# Altium footprint library WR-DSUB.PcbLib: 64 footprints (part 3 of 4)
Each footprint in its own frame and in the unit in brackets; x right, y up, seen from the top. Pads: shape width x height; smd on the part's side, far side on the other; paste and mask are expansions set on the pad; w line width, h text height; cw(c..) or ccw(c..) is an arc to the next point about the centre after c.
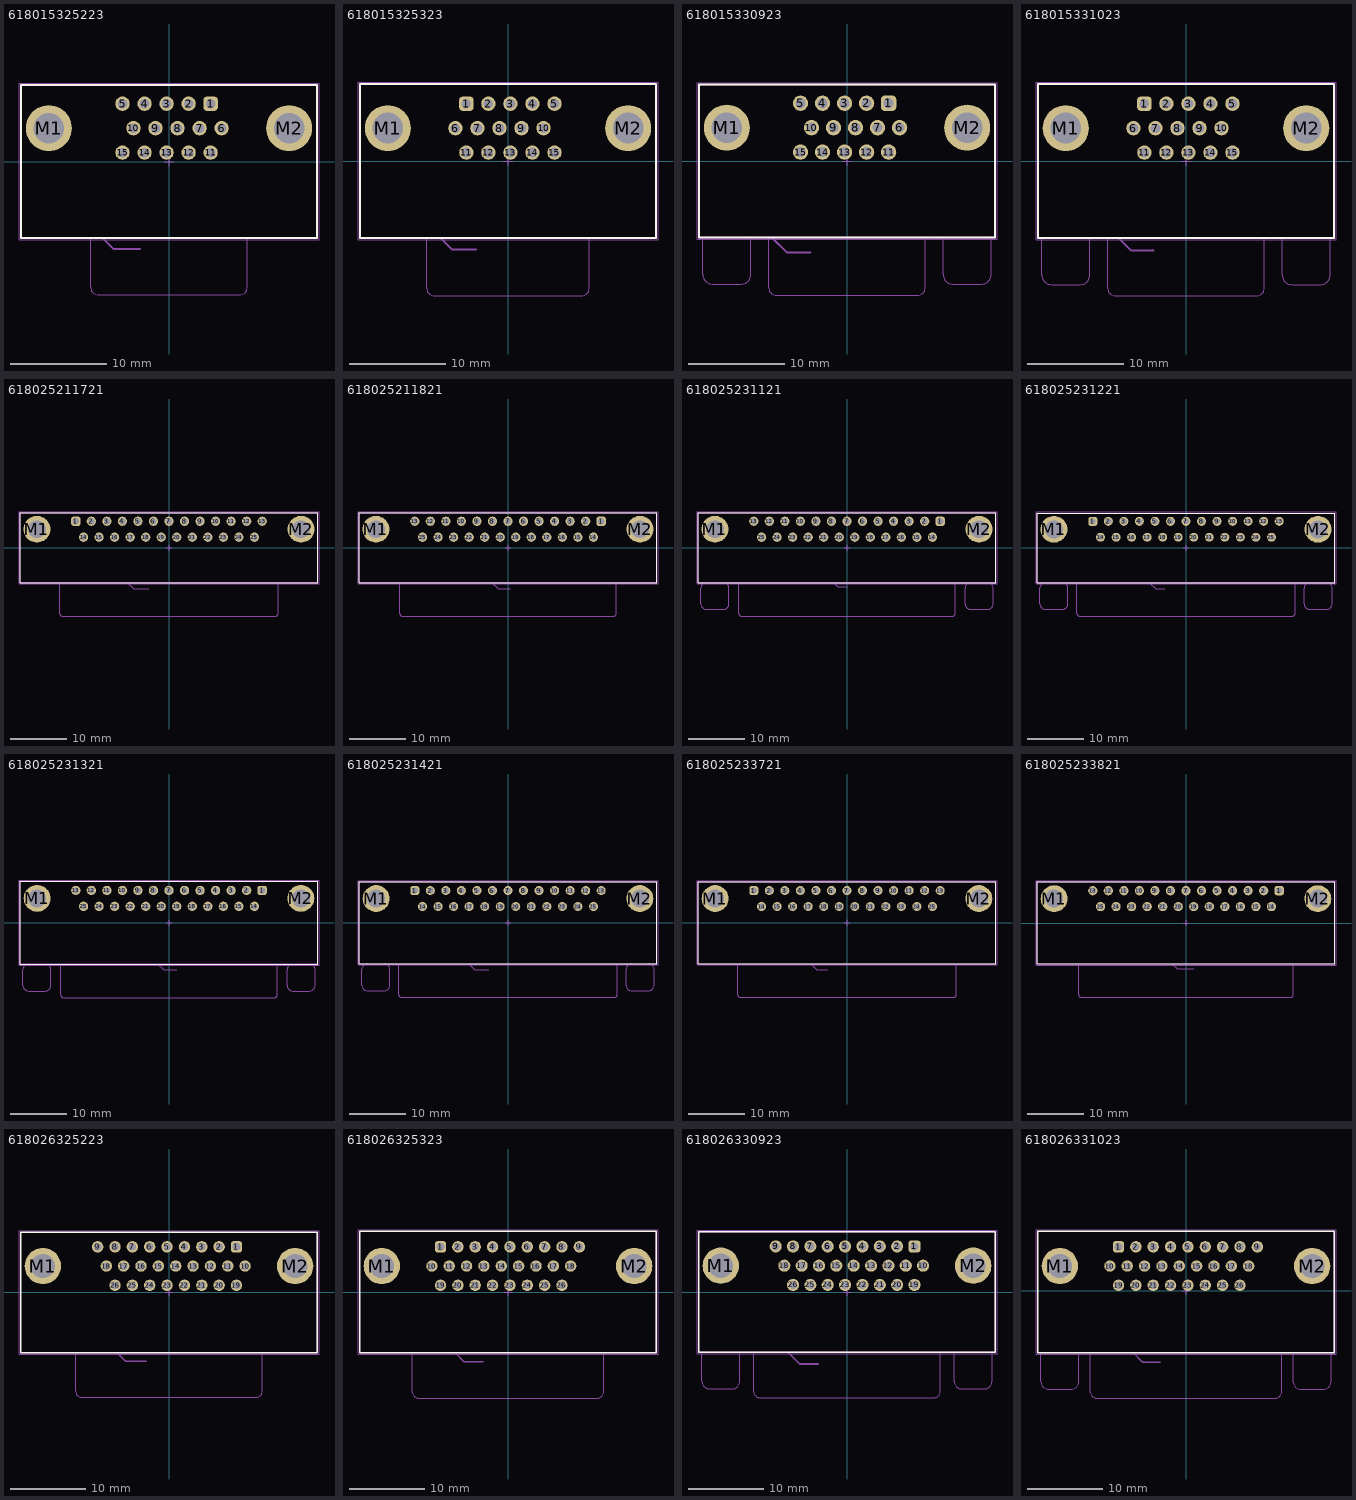
[diagram p2: the footprints below, top view; thin cyan lines are the x and y axes]

## 618015325223 [mm] "15 pins, right angled with Rivet"
height 12.5
pads (17):
  rrect50% 1.5x1.5 hole 1: 1(4.326,6.02)
  round 1.5 hole 1: 2(2.036,6.02) 3(-0.254,6.02) 4(-2.544,6.02) 5(-4.834,6.02) 6(5.466,3.48) 7(3.176,3.48) 8(0.886,3.48) 9(-1.404,3.48) 10(-3.694,3.48) 11(4.326,0.94) 12(2.036,0.94) 13(-0.254,0.94) 14(-2.544,0.94) 15(-4.834,0.94)
  round 4.8 hole 3.2: M1(-12.495,3.48) M2(12.495,3.48)
Top Overlay:
  lines w0.2: -15.4,-7.95 15.4,-7.95 15.4,7.95 -15.4,7.95 -15.4,-7.95
Assembly Notes:
  lines w0.2: -15.4,-7.95 15.4,-7.95 ; -6.9,-7.95 -5.75,-9.1 -3,-9.1
  text "PCB Edge" at -2.6,-9.6 h1.02
Top Assembly:
  lines w0.1: -8.15,-7.95 -8.15,-13.05 ccw(c-7.35,-13.05) -7.35,-13.85 7.35,-13.85 ccw(c7.35,-13.05) 8.15,-13.05 8.15,-7.95 ; -15.4,-7.95 -15.4,7.95 15.4,7.95 15.4,-7.95 -15.4,-7.95
Top Designator:
  text ".Designator" at -3.647,-0.357 h1
Top Courtyard:
  lines w0.05: -15.6,-8.15 -15.6,8.15 15.6,8.15 15.6,-8.15 -15.6,-8.15
Top Component Center:
  lines w0.1: -0.5,0 0.5,0 ; 0,-0.5 0,0.5
3D body "618015325223.stp": height 12.55, standoff -3.9, extent -15.402,-13.85 15.402,7.95

## 618015325323 [mm] "15 pins, right angled without Hex Screw"
height 12.5
pads (17):
  rrect50% 1.5x1.5 hole 1: 1(-4.326,5.97)
  round 1.5 hole 1: 2(-2.036,5.97) 3(0.254,5.97) 4(2.544,5.97) 5(4.834,5.97) 6(-5.466,3.43) 7(-3.176,3.43) 8(-0.886,3.43) 9(1.404,3.43) 10(3.694,3.43) 11(-4.326,0.89) 12(-2.036,0.89) 13(0.254,0.89) 14(2.544,0.89) 15(4.834,0.89)
  round 4.8 hole 3.2: M1(-12.495,3.43) M2(12.495,3.43)
Top Overlay:
  lines w0.2: -15.4,-8 15.4,-8 15.4,8 -15.4,8 -15.4,-8
Assembly Notes:
  lines w0.2: -15.4,-8 15.4,-8 ; -7,-8 -5.8,-9.2 -3.3,-9.2
  text "PCB Edge" at -3,-9.75 h1.02
Top Assembly:
  lines w0.1: -8.46,-8 -8.46,-13.2 ccw(c-7.66,-13.2) -7.66,-14 7.66,-14 ccw(c7.66,-13.2) 8.46,-13.2 8.46,-8 ; -15.4,-8 -15.4,8 15.4,8 15.4,-8 -15.4,-8
Top Designator:
  text ".Designator" at -3.647,-0.357 h1
Top Courtyard:
  lines w0.05: -15.6,-8.2 15.6,-8.2 15.6,8.2 -15.6,8.2 -15.6,-8.2
Top Component Center:
  lines w0.1: -0.5,0 0.5,0 ; 0,-0.5 0,0.5
3D body "618015325323.stp": height 12.75, standoff -3.7, extent -15.4,-14 15.4,8

## 618015330923 [mm] "15 pins, right angled"
height 12.5
pads (17):
  rrect50% 1.6x1.6 hole 1.05: 1(4.326,6.02)
  round 1.6 hole 1.05: 2(2.036,6.02) 3(-0.254,6.02) 4(-2.544,6.02) 5(-4.834,6.02) 6(5.466,3.48) 7(3.176,3.48) 8(0.886,3.48) 9(-1.404,3.48) 10(-3.694,3.48) 11(4.326,0.94) 12(2.036,0.94) 13(-0.254,0.94) 14(-2.544,0.94) 15(-4.834,0.94)
  round 4.8 hole 3.2: M1(-12.495,3.48) M2(12.495,3.48)
Top Overlay:
  lines w0.2: -15.4,-7.95 15.4,-7.95 15.4,7.95 -15.4,7.95 -15.4,-7.95
Assembly Notes:
  lines w0.2: -15.4,-7.95 15.4,-7.95 ; -7.8,-7.95 -6.25,-9.5 -3.8,-9.5
  text "PCB Edge" at -3.4,-10.02 h1.02
Top Assembly:
  lines w0.1: -15,-7.95 -15,-11.79 ccw(c-14,-11.79) -14,-12.79 -11,-12.79 ccw(c-11,-11.79) -10,-11.79 -10,-7.95 ; -8.15,-7.95 -8.15,-13.15 ccw(c-7.35,-13.15) -7.35,-13.95 7.35,-13.95 ccw(c7.35,-13.15) 8.15,-13.15 8.15,-7.95 ; 10,-7.95 10,-11.79 ccw(c11,-11.79) 11,-12.79 14,-12.79 ccw(c14,-11.79) 15,-11.79 15,-7.95 ; -15.4,-7.95 -15.4,7.95 15.4,7.95 15.4,-7.95 -15.4,-7.95
Top Designator:
  text ".Designator" at -3.647,-0.357 h1
Top Courtyard:
  lines w0.05: -15.6,-8.15 15.6,-8.15 15.6,8.15 -15.6,8.15 -15.6,-8.15
Top Component Center:
  lines w0.1: -0.5,0 0.5,0 ; 0,-0.5 0,0.5
3D body "618015330923.stp": height 12.55, standoff -3.95, extent -15.402,-13.95 15.402,7.95

## 618015331023 [mm] "15 pins, right angled with Hex Screw"
height 12.5
pads (17):
  rrect50% 1.5x1.5 hole 1: 1(-4.326,5.97)
  round 1.5 hole 1: 2(-2.036,5.97) 3(0.254,5.97) 4(2.544,5.97) 5(4.834,5.97) 6(-5.466,3.43) 7(-3.176,3.43) 8(-0.886,3.43) 9(1.404,3.43) 10(3.694,3.43) 11(-4.326,0.89) 12(-2.036,0.89) 13(0.254,0.89) 14(2.544,0.89) 15(4.834,0.89)
  round 4.8 hole 3.2: M1(-12.5,3.43) M2(12.5,3.43)
Top Overlay:
  lines w0.2: -15.4,-8 15.4,-8 15.4,8 -15.4,8 -15.4,-8
Assembly Notes:
  lines w0.2: -15.4,-8 15.4,-8 ; -7,-8 -5.7,-9.3 -3.4,-9.3
  text "PCB Edge" at -3.1,-9.75 h1.02
Top Assembly:
  lines w0.1: -15,-8 -15,-11.84 ccw(c-14,-11.84) -14,-12.84 -11,-12.84 ccw(c-11,-11.84) -10,-11.84 -10,-8 ; -8.15,-8 -8.15,-13.2 ccw(c-7.35,-13.2) -7.35,-14 7.35,-14 ccw(c7.35,-13.2) 8.15,-13.2 8.15,-8 ; 10,-8 10,-11.84 ccw(c11,-11.84) 11,-12.84 14,-12.84 ccw(c14,-11.84) 15,-11.84 15,-8 ; -15.4,-8 -15.4,8 15.4,8 15.4,-8 -15.4,-8
Top Designator:
  text ".Designator" at -3.647,-0.357 h1
Top Courtyard:
  lines w0.05: -15.6,-8.2 15.6,-8.2 15.6,8.2 -15.6,8.2 -15.6,-8.2
Top Component Center:
  lines w0.1: -0.5,0 0.5,0 ; 0,-0.5 0,0.5
3D body "618015331023.stp": height 12.55, standoff -3.9, extent -15.402,-14 15.402,8

## 618025211721 [mm] "25 pins, right angled, 8.08mm, board lock & UNC4-40 rivet without hex screw"
height 12.5
pads (27):
  rrect50% 1.65x1.65 hole 1.09: 1(-16.62,4.72)
  round 1.65 hole 1.09: 2(-13.85,4.72) 3(-11.08,4.72) 4(-8.31,4.72) 5(-5.54,4.72) 6(-2.77,4.72) 7(0,4.72) 8(2.77,4.72) 9(5.54,4.72) 10(8.31,4.72) 11(11.08,4.72) 12(13.85,4.72) 13(16.62,4.72) 14(-15.235,1.88) 15(-12.465,1.88) 16(-9.695,1.88) 17(-6.925,1.88) 18(-4.155,1.88) 19(-1.385,1.88) 20(1.385,1.88) 21(4.155,1.88) 22(6.925,1.88) 23(9.695,1.88) 24(12.465,1.88) 25(15.235,1.88)
  round 4.8 hole 3.2: M1(-23.55,3.3) M2(23.55,3.3)
Top Overlay:
  lines w0.2: -26.55,-6.2 26.55,-6.2 26.55,6.2 -26.55,6.2 -26.55,-6.2
Assembly Notes:
  lines w0.2: -26.55,-6.12 26.55,-6.12 ; -7.5,-6.12 -6.32,-7.3 -3.6,-7.3
  text "PCB Edge" at -3.1,-7.8 h1.02
Top Assembly:
  lines w0.1: -19.48,-6.2 -19.48,-11.7 ccw(c-18.98,-11.7) -18.98,-12.2 18.98,-12.2 ccw(c18.98,-11.7) 19.48,-11.7 19.48,-6.2 ; -26.55,-6.2 -26.55,6.2 26.55,6.2 26.55,-6.2 -26.55,-6.2
Top Designator:
  text ".Designator" at -3.647,-0.357 h1
Top Courtyard:
  lines w0.05: -26.75,-6.4 26.75,-6.4 26.75,6.4 -26.75,6.4 -26.75,-6.4
Top Component Center:
  lines w0.1: -0.5,0 0.5,0 ; 0,-0.5 0,0.5
3D body "618025211721.stp": height 12.55, standoff -3.95, extent -26.55,-12.2 26.55,6.2

## 618025211821 [mm] "25p 8.08mm bracket, board lock & UNC4-40 Rivet without hex screw"
height 12.5
pads (27):
  rrect50% 1.65x1.65 hole 1.09: 1(16.62,4.72)
  round 1.65 hole 1.09: 2(13.85,4.72) 3(11.08,4.72) 4(8.31,4.72) 5(5.54,4.72) 6(2.77,4.72) 7(0,4.72) 8(-2.77,4.72) 9(-5.54,4.72) 10(-8.31,4.72) 11(-11.08,4.72) 12(-13.85,4.72) 13(-16.62,4.72) 14(15.235,1.88) 15(12.465,1.88) 16(9.695,1.88) 17(6.925,1.88) 18(4.155,1.88) 19(1.385,1.88) 20(-1.385,1.88) 21(-4.155,1.88) 22(-6.925,1.88) 23(-9.695,1.88) 24(-12.465,1.88) 25(-15.235,1.88)
  round 4.8 hole 3.2: M1(-23.55,3.3) M2(23.55,3.3)
Top Overlay:
  lines w0.2: -26.55,-6.2 -26.55,6.2 26.55,6.2 26.55,-6.2 -26.55,-6.2
Assembly Notes:
  lines w0.2: -26.55,-6.12 26.55,-6.12 ; -3,-6.12 -1.77,-7.35 0.4,-7.35
  text "PCB Edge" at 0.7,-8.05 h1.02
Top Assembly:
  lines w0.1: -19.3,-6.2 -19.3,-11.7 ccw(c-18.8,-11.7) -18.8,-12.2 ; -18.85,-12.2 18.8,-12.2 ccw(c18.8,-11.7) 19.3,-11.7 19.3,-6.2 ; -26.55,-6.2 26.55,-6.2 26.55,6.2 -26.55,6.2 -26.55,-6.2
Top Designator:
  text ".Designator" at -3.647,-0.357 h1
Top Courtyard:
  lines w0.05: -26.75,-6.4 26.75,-6.4 26.75,6.4 -26.75,6.4 -26.75,-6.4
Top Component Center:
  lines w0.1: -0.5,0 0.5,0 ; 0,-0.5 0,0.5
3D body "618025211821.stp": height 12.55, standoff -3.95, extent -26.55,-12.2 26.55,6.2

## 618025231121 [mm] "25 pins, right angled, 8.08mm, with hex screw"
height 12.5
pads (27):
  rrect50% 1.65x1.65 hole 1.09: 1(16.62,4.72)
  round 1.65 hole 1.09: 2(13.85,4.72) 3(11.08,4.72) 4(8.31,4.72) 5(5.54,4.72) 6(2.77,4.72) 7(0,4.72) 8(-2.77,4.72) 9(-5.54,4.72) 10(-8.31,4.72) 11(-11.08,4.72) 12(-13.85,4.72) 13(-16.62,4.72) 14(15.235,1.88) 15(12.465,1.88) 16(9.695,1.88) 17(6.925,1.88) 18(4.155,1.88) 19(1.385,1.88) 20(-1.385,1.88) 21(-4.155,1.88) 22(-6.925,1.88) 23(-9.695,1.88) 24(-12.465,1.88) 25(-15.235,1.88)
  round 4.8 hole 3.2: M1(-23.55,3.3) M2(23.55,3.3)
Top Overlay:
  lines w0.2: -26.55,-6.2 -26.55,6.2 26.55,6.2 26.55,-6.2 -26.55,-6.2
Assembly Notes:
  lines w0.2: -26.55,-6.12 26.55,-6.12 ; -2.5,-6.12 -1.67,-6.95 0,-6.95
  text "PCB Edge" at 0.4,-7.55 h1.02
Top Assembly:
  lines w0.1: -25.05,-6.2 ccw(c-25.05,-7.2) -26.05,-7.2 -26.05,-10 ccw(c-25.05,-10) -25.05,-11 -22.05,-11 ccw(c-22.05,-10) -21.05,-10 -21.05,-7.2 ccw(c-22.05,-7.2) -22.05,-6.2 ; -19.3,-6.2 -19.3,-11.7 ccw(c-18.8,-11.7) -18.8,-12.2 18.8,-12.2 ccw(c18.8,-11.7) 19.3,-11.7 19.3,-6.2 ; 22.05,-6.2 ccw(c22.05,-7.2) 21.05,-7.2 21.05,-10 ccw(c22.05,-10) 22.05,-11 25.05,-11 ccw(c25.05,-10) 26.05,-10 26.05,-7.2 ccw(c25.05,-7.2) 25.05,-6.2 ; -26.55,-6.2 -26.55,6.2 26.55,6.2 26.55,-6.2 -26.55,-6.2 ; 10.5,-12.2 10.5,-12.2
Top Designator:
  text ".Designator" at -3.647,-0.357 h1
Top Courtyard:
  lines w0.05: -26.75,-6.4 26.75,-6.4 26.75,6.4 -26.75,6.4 -26.75,-6.4
Top Component Center:
  lines w0.1: -0.5,0 0.5,0 ; 0,-0.5 0,0.5
3D body "618025231121.stp": height 12.55, standoff -3.95, extent -26.55,-12.2 26.55,6.2

## 618025231221 [mm] "25 pins, right angled, 8.08mm, with hex screw"
height 12.5
pads (27):
  rrect50% 1.6x1.6 hole 1.04: 1(-16.62,4.72)
  round 1.6 hole 1.04: 2(-13.85,4.72) 3(-11.08,4.72) 4(-8.31,4.72) 5(-5.54,4.72) 6(-2.77,4.72) 7(0,4.72) 8(2.77,4.72) 9(5.54,4.72) 10(8.31,4.72) 11(11.08,4.72) 12(13.85,4.72) 13(16.62,4.72) 14(-15.235,1.88) 15(-12.465,1.88) 16(-9.695,1.88) 17(-6.925,1.88) 18(-4.155,1.88) 19(-1.385,1.88) 20(1.385,1.88) 21(4.155,1.88) 22(6.925,1.88) 23(9.695,1.88) 24(12.465,1.88) 25(15.235,1.88)
  round 4.8 hole 3.2: M1(-23.55,3.3) M2(23.55,3.3)
Top Overlay:
  lines w0.2: -26.55,-6.2 26.55,-6.2 26.55,6.2 -26.55,6.2 -26.55,-6.2
Assembly Notes:
  lines w0.2: -26.55,-6.12 26.55,-6.12 ; -6.6,-6.12 -5.42,-7.3 -3.8,-7.3
  text "PCB Edge" at -3.4,-7.82 h1.02
Top Assembly:
  lines w0.1: -25.05,-6.2 ccw(c-25.05,-7.2) -26.05,-7.2 -26.05,-10 ccw(c-25.05,-10) -25.05,-11 -22.05,-11 ccw(c-22.05,-10) -21.05,-10 -21.05,-7.2 ccw(c-22.05,-7.2) -22.05,-6.2 ; -19.48,-6.2 -19.48,-11.68 ccw(c-18.98,-11.68) -18.98,-12.18 18.98,-12.18 ccw(c18.98,-11.68) 19.48,-11.68 19.48,-6.2 ; 22.05,-6.2 ccw(c22.05,-7.2) 21.05,-7.2 21.05,-10 ccw(c22.05,-10) 22.05,-11 25.05,-11 ccw(c25.05,-10) 26.05,-10 26.05,-7.2 ccw(c25.05,-7.2) 25.05,-6.2 ; -26.55,-6.2 -26.55,6.2 26.55,6.2 26.55,-6.2 -26.55,-6.2
Top Designator:
  text ".Designator" at -3.647,-0.357 h1
Top Courtyard:
  lines w0.05: -26.75,-6.4 -26.75,6.4 26.75,6.4 26.75,-6.4 -26.75,-6.4
Top Component Center:
  lines w0.1: -0.5,0 0.5,0 ; 0,-0.5 0,0.5
3D body "618025231221.stp": height 12.55, standoff -3.95, extent -26.55,-12.2 26.55,6.2

## 618025231321 [mm] "25 pins, right angled, 10.3mm, with hex screw"
height 12.5
pads (27):
  rrect50% 1.65x1.65 hole 1.09: 1(16.62,5.78)
  round 1.65 hole 1.09: 2(13.85,5.78) 3(11.08,5.78) 4(8.31,5.78) 5(5.54,5.78) 6(2.77,5.78) 7(0,5.78) 8(-2.77,5.78) 9(-5.54,5.78) 10(-8.31,5.78) 11(-11.08,5.78) 12(-13.85,5.78) 13(-16.62,5.78) 14(15.235,2.94) 15(12.465,2.94) 16(9.695,2.94) 17(6.925,2.94) 18(4.155,2.94) 19(1.385,2.94) 20(-1.385,2.94) 21(-4.155,2.94) 22(-6.925,2.94) 23(-9.695,2.94) 24(-12.465,2.94) 25(-15.235,2.94)
  round 4.8 hole 3.2: M1(-23.52,4.36) M2(23.52,4.36)
Top Overlay:
  lines w0.2: -26.55,-7.36 -26.55,7.37 26.55,7.37 26.55,-7.36 -26.55,-7.36
Assembly Notes:
  lines w0.2: -26.55,-7.26 26.55,-7.26 ; -2.1,-7.26 -0.96,-8.4 1.4,-8.4
  text "PCB Edge" at 1.8,-8.8 h1.02
Top Assembly:
  lines w0.1: -25.05,-7.36 ccw(c-25.05,-8.36) -26.05,-8.36 -26.05,-11.16 ccw(c-25.05,-11.16) -25.05,-12.16 -22.05,-12.16 ccw(c-22.05,-11.16) -21.05,-11.16 -21.05,-8.36 ccw(c-22.05,-8.36) -22.05,-7.36 ; -19.3,-7.36 -19.3,-12.86 ccw(c-18.8,-12.86) -18.8,-13.36 18.8,-13.36 ; 19.3,-7.36 19.3,-12.86 cw(c18.8,-12.86) 18.8,-13.36 ; 22.05,-7.36 ccw(c22.05,-8.36) 21.05,-8.36 21.05,-11.16 ccw(c22.05,-11.16) 22.05,-12.16 25.05,-12.16 ccw(c25.05,-11.16) 26.05,-11.16 26.05,-8.36 ccw(c25.05,-8.36) 25.05,-7.36 ; 18.8,-13.36 18.8,-13.36 ; -26.55,-7.36 26.55,-7.36 26.55,7.37 -26.55,7.37 -26.55,-7.36
Top Designator:
  text ".Designator" at -3.647,-0.357 h1
Top Courtyard:
  lines w0.05: -26.75,-7.59 26.75,-7.59 26.75,7.59 -26.75,7.59 -26.75,-7.59
Top Component Center:
  lines w0.1: -0.5,0 0.5,0 ; 0,-0.5 0,0.5
3D body "618025231321.stp": height 12.57, standoff -3.77, extent -26.535,-13.26 26.535,7.39

## 618025231421 [mm] "25 pins, right angled, 10.3mm, with hex screw"
height 12.5
pads (27):
  rrect50% 1.6x1.6 hole 1.09: 1(-16.62,5.735)
  round 1.6 hole 1.09: 2(-13.85,5.735) 3(-11.08,5.735) 4(-8.31,5.735) 5(-5.54,5.735) 6(-2.77,5.735) 7(0,5.735) 8(2.77,5.735) 9(5.54,5.735) 10(8.31,5.735) 11(11.08,5.735) 12(13.85,5.735) 13(16.62,5.735) 14(-15.235,2.895) 15(-12.465,2.895) 16(-9.695,2.895) 17(-6.925,2.895) 18(-4.155,2.895) 19(-1.385,2.895) 20(1.385,2.895) 21(4.155,2.895) 22(6.925,2.895) 23(9.695,2.895) 24(12.465,2.895) 25(15.235,2.895)
  round 4.8 hole 3.2: M1(-23.52,4.315) M2(23.52,4.315)
Top Overlay:
  lines w0.2: -26.55,-7.325 -26.55,7.325 26.55,7.325 26.55,-7.325 -26.55,-7.325
Assembly Notes:
  lines w0.2: -26.55,-7.325 26.55,-7.325 ; -7,-7.325 -5.905,-8.42 -3.4,-8.42
  text "PCB Edge" at -3.1,-8.92 h1.02
Top Assembly:
  lines w0.1: -25.05,-7.325 ccw(c-25.05,-8.325) -26.05,-8.325 -26.05,-11.125 ccw(c-25.05,-11.125) -25.05,-12.125 -22.05,-12.125 ccw(c-22.05,-11.125) -21.05,-11.125 -21.05,-8.325 ccw(c-22.05,-8.325) -22.05,-7.325 ; -19.48,-7.325 -19.48,-12.825 ccw(c-18.98,-12.825) -18.98,-13.325 18.98,-13.325 ccw(c18.98,-12.825) 19.48,-12.825 19.48,-7.325 ; 22.05,-7.325 ccw(c22.05,-8.325) 21.05,-8.325 21.05,-11.125 ccw(c22.05,-11.125) 22.05,-12.125 25.05,-12.125 ccw(c25.05,-11.125) 26.05,-11.125 26.05,-8.325 ccw(c25.05,-8.325) 25.05,-7.325 ; -26.55,-7.325 26.55,-7.325 26.55,7.325 -26.55,7.325 -26.55,-7.325
Top Designator:
  text ".Designator" at -3.647,-0.357 h1
Top Courtyard:
  lines w0.05: -26.75,-7.525 26.75,-7.525 26.75,7.525 -26.75,7.525 -26.75,-7.525
Top Component Center:
  lines w0.1: -0.5,0 0.5,0 ; 0,-0.5 0,0.5
3D body "618025231421.stp": height 12.62, standoff -3.72, extent -26.52,-13.325 26.52,7.325

## 618025233721 [mm] "25 pins, right angled, 10.3mm, board lock & UNC4-40 rivet without hex screw"
height 12.5
pads (27):
  rrect50% 1.6x1.6 hole 1.09: 1(-16.62,5.735)
  round 1.6 hole 1.09: 2(-13.85,5.735) 3(-11.08,5.735) 4(-8.31,5.735) 5(-5.54,5.735) 6(-2.77,5.735) 7(0,5.735) 8(2.77,5.735) 9(5.54,5.735) 10(8.31,5.735) 11(11.08,5.735) 12(13.85,5.735) 13(16.62,5.735) 14(-15.235,2.895) 15(-12.465,2.895) 16(-9.695,2.895) 17(-6.925,2.895) 18(-4.155,2.895) 19(-1.385,2.895) 20(1.385,2.895) 21(4.155,2.895) 22(6.925,2.895) 23(9.695,2.895) 24(12.465,2.895) 25(15.235,2.895)
  round 4.8 hole 3.2: M1(-23.52,4.315) M2(23.52,4.315)
Top Overlay:
  lines w0.2: -26.55,-7.325 -26.55,7.325 26.55,7.325 26.55,-7.325 -26.55,-7.325
Assembly Notes:
  lines w0.2: -26.55,-7.305 26.55,-7.305 ; -6.5,-7.305 -5.405,-8.4 -3.4,-8.4
  text "PCB Edge" at -3.1,-9 h1.02
Top Assembly:
  lines w0.1: -19.48,-7.325 -19.48,-12.825 ccw(c-18.98,-12.825) -18.98,-13.325 18.98,-13.325 ccw(c18.98,-12.825) 19.48,-12.825 19.48,-7.325 ; -26.55,-7.325 26.55,-7.325 26.55,7.325 -26.55,7.325 -26.55,-7.325
Top Designator:
  text ".Designator" at -3.647,-0.357 h1
Top Courtyard:
  lines w0.05: -26.75,-7.525 -26.75,7.525 26.75,7.525 26.75,-7.525 -26.75,-7.525
Top Component Center:
  lines w0.1: -0.5,0 0.5,0 ; 0,-0.5 0,0.5
3D body "618025233721.stp": height 12.57, standoff -3.77, extent -26.568,-13.325 26.568,7.325

## 618025233821 [mm] "25p 10.3mm bracket, board lock & UNC4-40 Rivet without hex screw"
height 12.5
pads (27):
  rrect50% 1.65x1.65 hole 1.09: 1(16.62,5.765)
  round 1.65 hole 1.09: 2(13.85,5.765) 3(11.08,5.765) 4(8.31,5.765) 5(5.54,5.765) 6(2.77,5.765) 7(0,5.765) 8(-2.77,5.765) 9(-5.54,5.765) 10(-8.31,5.765) 11(-11.08,5.765) 12(-13.85,5.765) 13(-16.62,5.765) 14(15.235,2.925) 15(12.465,2.925) 16(9.695,2.925) 17(6.925,2.925) 18(4.155,2.925) 19(1.385,2.925) 20(-1.385,2.925) 21(-4.155,2.925) 22(-6.925,2.925) 23(-9.695,2.925) 24(-12.465,2.925) 25(-15.235,2.925)
  round 4.8 hole 3.2: M1(-23.52,4.345) M2(23.52,4.345)
Top Overlay:
  lines w0.2: -26.55,-7.275 -26.55,7.375 26.55,7.375 26.55,-7.275 -26.55,-7.275
Assembly Notes:
  lines w0.2: -26.55,-7.275 26.55,-7.275 ; -2.5,-7.275 -1.575,-8.2 1.4,-8.2
  text "PCB Edge" at 1.8,-8.7 h1.02
Top Assembly:
  lines w0.1: -19.15,-7.275 -19.15,-12.775 ccw(c-18.65,-12.775) -18.65,-13.275 18.65,-13.275 ; 19.15,-7.275 19.15,-12.775 cw(c18.65,-12.775) 18.65,-13.275 ; 18.65,-13.275 18.65,-13.275 ; -26.55,-7.275 26.55,-7.275 26.55,7.375 -26.55,7.375 -26.55,-7.275
Top Designator:
  text ".Designator" at -3.647,-0.357 h1
Top Courtyard:
  lines w0.05: -26.75,-7.575 26.75,-7.575 26.75,7.575 -26.75,7.575 -26.75,-7.575
Top Component Center:
  lines w0.1: -0.5,0 0.5,0 ; 0,-0.5 0,0.5
3D body "618025233821.stp": height 12.57, standoff -3.77, extent -26.535,-13.275 26.535,7.375

## 618026325223 [mm] "26 pins, right angled with Rivet"
height 12.5
pads (28):
  rrect50% 1.5x1.5 hole 1: 1(8.906,6.02)
  round 1.5 hole 1: 2(6.616,6.02) 3(4.326,6.02) 4(2.036,6.02) 5(-0.254,6.02) 6(-2.544,6.02) 7(-4.834,6.02) 8(-7.124,6.02) 9(-9.414,6.02) 10(10.046,3.48) 11(7.756,3.48) 12(5.466,3.48) 13(3.176,3.48) 14(0.886,3.48) 15(-1.404,3.48) 16(-3.694,3.48) 17(-5.984,3.48) 18(-8.274,3.48) 19(8.906,0.94) 20(6.616,0.94) 21(4.326,0.94) 22(2.036,0.94) 23(-0.254,0.94) 24(-2.544,0.94) 25(-4.834,0.94) 26(-7.124,0.94)
  round 4.8 hole 3.2: M1(-16.65,3.48) M2(16.65,3.48)
Top Overlay:
  lines w0.2: -19.6,-7.95 -19.6,7.95 19.6,7.95 19.6,-7.95 -19.6,-7.95
Assembly Notes:
  lines w0.2: -19.6,-7.95 19.6,-7.95 ; -6.9,-7.95 -5.75,-9.1 -3,-9.1
  text "PCB Edge" at -2.6,-9.6 h1.02
Top Assembly:
  lines w0.1: -12.3,-7.95 -12.3,-13.05 ccw(c-11.5,-13.05) -11.5,-13.85 11.5,-13.85 ccw(c11.5,-13.05) 12.3,-13.05 12.3,-7.95 ; -19.6,-7.95 19.6,-7.95 19.6,7.95 -19.6,7.95 -19.6,-7.95
Top Designator:
  text ".Designator" at -3.647,-0.357 h1
Top Courtyard:
  lines w0.05: -19.8,-8.15 19.8,-8.15 19.8,8.15 -19.8,8.15 -19.8,-8.15
Top Component Center:
  lines w0.1: -0.5,0 0.5,0 ; 0,-0.5 0,0.5
3D body "618026325223.stp": height 12.55, standoff -3.9, extent -19.598,-13.85 19.613,7.95

## 618026325323 [mm] "26 pins, right angled without Hex Screw"
height 12.5
pads (28):
  rrect50% 1.5x1.5 hole 1: 1(-8.906,5.97)
  round 1.5 hole 1: 2(-6.616,5.97) 3(-4.326,5.97) 4(-2.036,5.97) 5(0.254,5.97) 6(2.544,5.97) 7(4.834,5.97) 8(7.124,5.97) 9(9.414,5.97) 10(-10.046,3.43) 11(-7.756,3.43) 12(-5.466,3.43) 13(-3.176,3.43) 14(-0.886,3.43) 15(1.404,3.43) 16(3.694,3.43) 17(5.984,3.43) 18(8.274,3.43) 19(-8.906,0.89) 20(-6.616,0.89) 21(-4.326,0.89) 22(-2.036,0.89) 23(0.254,0.89) 24(2.544,0.89) 25(4.834,0.89) 26(7.124,0.89)
  round 4.8 hole 3.2: M1(-16.66,3.43) M2(16.66,3.43)
Top Overlay:
  lines w0.2: -19.6,-8 19.6,-8 19.6,8 -19.6,8 -19.6,-8
Assembly Notes:
  lines w0.2: -19.6,-8 19.6,-8 ; -7,-8 -5.8,-9.2 -3.3,-9.2
  text "PCB Edge" at -3,-9.75 h1.02
Top Assembly:
  lines w0.1: -12.625,-8 -12.625,-13.2 ccw(c-11.825,-13.2) -11.825,-14 11.825,-14 ccw(c11.825,-13.2) 12.625,-13.2 12.625,-8 ; -19.6,-8 -19.6,8 19.6,8 19.6,-8 -19.6,-8
Top Designator:
  text ".Designator" at -3.647,-0.357 h1
Top Courtyard:
  lines w0.05: -19.8,-8.2 19.8,-8.2 19.8,8.2 -19.8,8.2 -19.8,-8.2
Top Component Center:
  lines w0.1: -0.5,0 0.5,0 ; 0,-0.5 0,0.5
3D body "618026325323.stp": height 12.75, standoff -3.7, extent -19.6,-14 19.6,8

## 618026330923 [mm] "26 pins, right angled"
height 12.5
pads (28):
  rrect50% 1.6x1.6 hole 1.05: 1(8.906,6.02)
  round 1.6 hole 1.05: 2(6.616,6.02) 3(4.326,6.02) 4(2.036,6.02) 5(-0.254,6.02) 6(-2.544,6.02) 7(-4.834,6.02) 8(-7.124,6.02) 9(-9.414,6.02) 10(10.046,3.48) 11(7.756,3.48) 12(5.466,3.48) 13(3.176,3.48) 14(0.886,3.48) 15(-1.404,3.48) 16(-3.694,3.48) 17(-5.984,3.48) 18(-8.274,3.48) 19(8.906,0.94) 20(6.616,0.94) 21(4.326,0.94) 22(2.036,0.94) 23(-0.254,0.94) 24(-2.544,0.94) 25(-4.834,0.94) 26(-7.124,0.94)
  round 4.8 hole 3.2: M1(-16.66,3.48) M2(16.66,3.48)
Top Overlay:
  lines w0.2: -19.6,-7.95 -19.6,7.95 19.6,7.95 19.6,-7.95 -19.6,-7.95
Assembly Notes:
  lines w0.2: -19.6,-7.95 19.6,-7.95 ; -7.8,-7.95 -6.25,-9.5 -3.8,-9.5
  text "PCB Edge" at -3.4,-10.02 h1.02
Top Assembly:
  lines w0.1: -19.15,-7.95 -19.15,-11.79 ccw(c-18.15,-11.79) -18.15,-12.79 -15.15,-12.79 ccw(c-15.15,-11.79) -14.15,-11.79 -14.15,-7.95 ; -12.3,-7.95 -12.3,-13.15 ccw(c-11.5,-13.15) -11.5,-13.95 11.5,-13.95 ccw(c11.5,-13.15) 12.3,-13.15 12.3,-7.95 ; 14.15,-7.95 14.15,-11.79 ccw(c15.15,-11.79) 15.15,-12.79 18.15,-12.79 ccw(c18.15,-11.79) 19.15,-11.79 19.15,-7.95 ; -19.6,-7.95 19.6,-7.95 19.6,7.95 -19.6,7.95 -19.6,-7.95
Top Designator:
  text ".Designator" at -3.647,-0.357 h1
Top Courtyard:
  lines w0.05: -19.8,-8.15 19.8,-8.15 19.8,8.15 -19.8,8.15 -19.8,-8.15
Top Component Center:
  lines w0.1: -0.5,0 0.5,0 ; 0,-0.5 0,0.5
3D body "618026330923.stp": height 12.55, standoff -3.9, extent -19.605,-13.85 19.605,7.95

## 618026331023 [mm] "26 pins, right angled with Hex Screw"
height 12.5
pads (28):
  rrect50% 1.5x1.5 hole 1: 1(-8.906,5.82)
  round 1.5 hole 1: 2(-6.616,5.82) 3(-4.326,5.82) 4(-2.036,5.82) 5(0.254,5.82) 6(2.544,5.82) 7(4.834,5.82) 8(7.124,5.82) 9(9.414,5.82) 10(-10.046,3.28) 11(-7.756,3.28) 12(-5.466,3.28) 13(-3.176,3.28) 14(-0.886,3.28) 15(1.404,3.28) 16(3.694,3.28) 17(5.984,3.28) 18(8.274,3.28) 19(-8.906,0.74) 20(-6.616,0.74) 21(-4.326,0.74) 22(-2.036,0.74) 23(0.254,0.74) 24(2.544,0.74) 25(4.834,0.74) 26(7.124,0.74)
  round 4.8 hole 3.2: M1(-16.65,3.28) M2(16.65,3.28)
Top Overlay:
  lines w0.2: -19.6,-8.15 19.6,-8.15 19.6,7.85 -19.6,7.85 -19.6,-8.15
Assembly Notes:
  lines w0.2: -19.6,-8.15 19.6,-8.15 ; -7,-8.15 -5.7,-9.45 -3.4,-9.45
  text "PCB Edge" at -3.1,-9.9 h1.02
Top Assembly:
  lines w0.1: -19.15,-8.15 -19.15,-11.99 ccw(c-18.15,-11.99) -18.15,-12.99 -15.15,-12.99 ccw(c-15.15,-11.99) -14.15,-11.99 -14.15,-8.15 ; -12.625,-8.15 -12.625,-13.35 ccw(c-11.825,-13.35) -11.825,-14.15 11.825,-14.15 ccw(c11.825,-13.35) 12.625,-13.35 12.625,-8.15 ; 14.15,-8.15 14.15,-11.99 ccw(c15.15,-11.99) 15.15,-12.99 18.15,-12.99 ccw(c18.15,-11.99) 19.15,-11.99 19.15,-8.15 ; -19.6,-8.15 -19.6,7.85 19.6,7.85 19.6,-8.15 -19.6,-8.15
Top Designator:
  text ".Designator" at -3.647,-0.357 h1
Top Courtyard:
  lines w0.05: -19.8,-8.35 19.8,-8.35 19.8,8.05 -19.8,8.05 -19.8,-8.35
Top Component Center:
  lines w0.1: -0.5,0 0.5,0 ; 0,-0.5 0,0.5
3D body "618026331023.stp": height 12.55, standoff -3.9, extent -19.605,-14.15 19.605,7.85